# Altium footprint library VNL5050S5-E.PcbLib: 3 footprints
Each footprint in its own frame and in the unit in brackets; x right, y up, seen from the top. Pads: shape width x height; smd on the part's side, far side on the other; paste and mask are expansions set on the pad; w line width, h text height; cw(c..) or ccw(c..) is an arc to the next point about the centre after c.
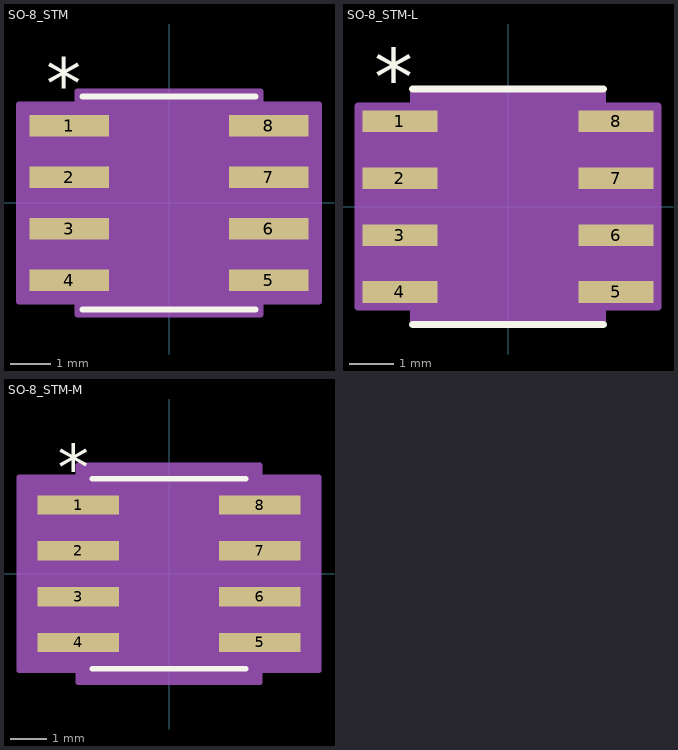
[diagram p0: the footprints below, top view; thin cyan lines are the x and y axes]

## SO-8_STM [mil]
pads (8):
  rect 77.56x20.97 smd paste+0 mask+0: 1(-97,75) 2(-97,25) 3(-97,-25) 4(-97,-75) 5(97,-75) 6(97,-25) 7(97,25) 8(97,75)
Top Overlay:
  lines w6: -84,-103.5 84,-103.5 ; -84,103.5 84,103.5
  text ".Designator" at -137.5,-25 h50
  text "*" at -119.5,90.97 h50
Mechanical 13:
  lines w1: -12,98.5 ccw(c0,98.5) 12,98.5 ; -122,-84.5 -122,-65.5 -79,-65.5 -79,-84.5 -122,-84.5 ; -122,-34.5 -122,-15.5 -79,-15.5 -79,-34.5 -122,-34.5 ; -122,15.5 -122,34.5 -79,34.5 -79,15.5 -122,15.5 ; -122,65.5 -122,84.5 -79,84.5 -79,65.5 -122,65.5 ; -79,-98.5 79,-98.5 79,98.5 -79,98.5 -79,-98.5 ; 79,-84.5 79,-65.5 122,-65.5 122,-84.5 79,-84.5 ; 79,-34.5 79,-15.5 122,-15.5 122,-34.5 79,-34.5 ; 79,15.5 79,34.5 122,34.5 122,15.5 79,15.5 ; 79,65.5 79,84.5 122,84.5 122,65.5 79,65.5
  text "*" at -76.5,45.5 h50
  text ".Designator" at -137.5,-25 h50
Mechanical 15:
  region: -89,-95.48 -145.78,-95.48 -145.78,95.48 -89,95.48 -89,108.5 89,108.5 89,95.48 145.78,95.48 145.78,-95.48 89,-95.48 89,-108.5 -89,-108.5
  lines w6: -145.78,-95.48 -145.78,95.48 -89,95.48 -89,108.5 89,108.5 89,95.48 145.78,95.48 145.78,-95.48 89,-95.48 89,-108.5 -89,-108.5 -89,-95.48 -145.78,-95.48
3D body "SO-8_STM.step": height 69.09, standoff 0, extent -122.01,-98.5 122.01,98.5

## SO-8_STM-L [mil]
pads (8):
  rect 65.75x19 smd paste+0 mask+0: 1(-95.03,75) 2(-95.03,25) 3(-95.03,-25) 4(-95.03,-75) 5(95.03,-75) 6(95.03,-25) 7(95.03,25) 8(95.03,75)
Top Overlay:
  lines w6: -84,-103.5 84,-103.5 ; -84,103.5 84,103.5
  text ".Designator" at -137.5,-25 h50
  text "*" at -117.53,89 h50
Mechanical 13:
  lines w1: -12,98.5 ccw(c0,98.5) 12,98.5 ; -122,-84.5 -122,-65.5 -79,-65.5 -79,-84.5 -122,-84.5 ; -122,-34.5 -122,-15.5 -79,-15.5 -79,-34.5 -122,-34.5 ; -122,15.5 -122,34.5 -79,34.5 -79,15.5 -122,15.5 ; -122,65.5 -122,84.5 -79,84.5 -79,65.5 -122,65.5 ; -79,-98.5 79,-98.5 79,98.5 -79,98.5 -79,-98.5 ; 79,-84.5 79,-65.5 122,-65.5 122,-84.5 79,-84.5 ; 79,-34.5 79,-15.5 122,-15.5 122,-34.5 79,-34.5 ; 79,15.5 79,34.5 122,34.5 122,15.5 79,15.5 ; 79,65.5 79,84.5 122,84.5 122,65.5 79,65.5
  text "*" at -76.5,45.5 h50
  text ".Designator" at -137.5,-25 h50
Mechanical 15:
  region: -83,-88.5 -131.91,-88.5 -131.91,88.5 -83,88.5 -83,102.5 83,102.5 83,88.5 131.91,88.5 131.91,-88.5 83,-88.5 83,-102.5 -83,-102.5
  lines w6: -131.91,-88.5 -131.91,88.5 -83,88.5 -83,102.5 83,102.5 83,88.5 131.91,88.5 131.91,-88.5 83,-88.5 83,-102.5 -83,-102.5 -83,-88.5 -131.91,-88.5
3D body "SO-8_STM.step": height 69.09, standoff 0, extent -122.01,-98.5 122.01,98.5

## SO-8_STM-M [mm]
pads (8):
  rect 2.27x0.533 smd paste+0 mask+0: 1(-2.514,1.905) 2(-2.514,0.635) 3(-2.514,-0.635) 4(-2.514,-1.905) 5(2.514,-1.905) 6(2.514,-0.635) 7(2.514,0.635) 8(2.514,1.905)
Top Overlay:
  lines w0.152: -2.134,-2.629 2.134,-2.629 ; -2.134,2.629 2.134,2.629
  text ".Designator" at -3.492,-0.635 h1.27
  text "*" at -3.085,2.311 h1.27
Mechanical 13:
  lines w0.025: -0.305,2.502 ccw(c0,2.502) 0.305,2.502 ; -3.099,-2.146 -3.099,-1.664 -2.007,-1.664 -2.007,-2.146 -3.099,-2.146 ; -3.099,-0.876 -3.099,-0.394 -2.007,-0.394 -2.007,-0.876 -3.099,-0.876 ; -3.099,0.394 -3.099,0.876 -2.007,0.876 -2.007,0.394 -3.099,0.394 ; -3.099,1.664 -3.099,2.146 -2.007,2.146 -2.007,1.664 -3.099,1.664 ; -2.007,-2.502 2.007,-2.502 2.007,2.502 -2.007,2.502 -2.007,-2.502 ; 2.007,-2.146 2.007,-1.664 3.099,-1.664 3.099,-2.146 2.007,-2.146 ; 2.007,-0.876 2.007,-0.394 3.099,-0.394 3.099,-0.876 2.007,-0.876 ; 2.007,0.394 2.007,0.876 3.099,0.876 3.099,0.394 2.007,0.394 ; 2.007,1.664 2.007,2.146 3.099,2.146 3.099,1.664 2.007,1.664
  text "*" at -1.943,1.156 h1.27
  text ".Designator" at -3.492,-0.635 h1.27
Mechanical 15:
  region: -2.515,-2.679 -4.157,-2.679 -4.157,2.679 -2.515,2.679 -2.515,3.01 2.515,3.01 2.515,2.679 4.157,2.679 4.157,-2.679 2.515,-2.679 2.515,-3.01 -2.515,-3.01
  lines w0.152: -4.157,-2.679 -4.157,2.679 -2.515,2.679 -2.515,3.01 2.515,3.01 2.515,2.679 4.157,2.679 4.157,-2.679 2.515,-2.679 2.515,-3.01 -2.515,-3.01 -2.515,-2.679 -4.157,-2.679
3D body "SO-8_STM.step": height 1.76, standoff 0, extent -3.099,-2.502 3.099,2.502